# Altium footprint library WR-FPC_0.50mm.PcbLib: 147 footprints (part 6 of 10)
Each footprint in its own frame and in the unit in brackets; x right, y up, seen from the top. Pads: shape width x height; smd on the part's side, far side on the other; paste and mask are expansions set on the pad; w line width, h text height; cw(c..) or ccw(c..) is an arc to the next point about the centre after c.
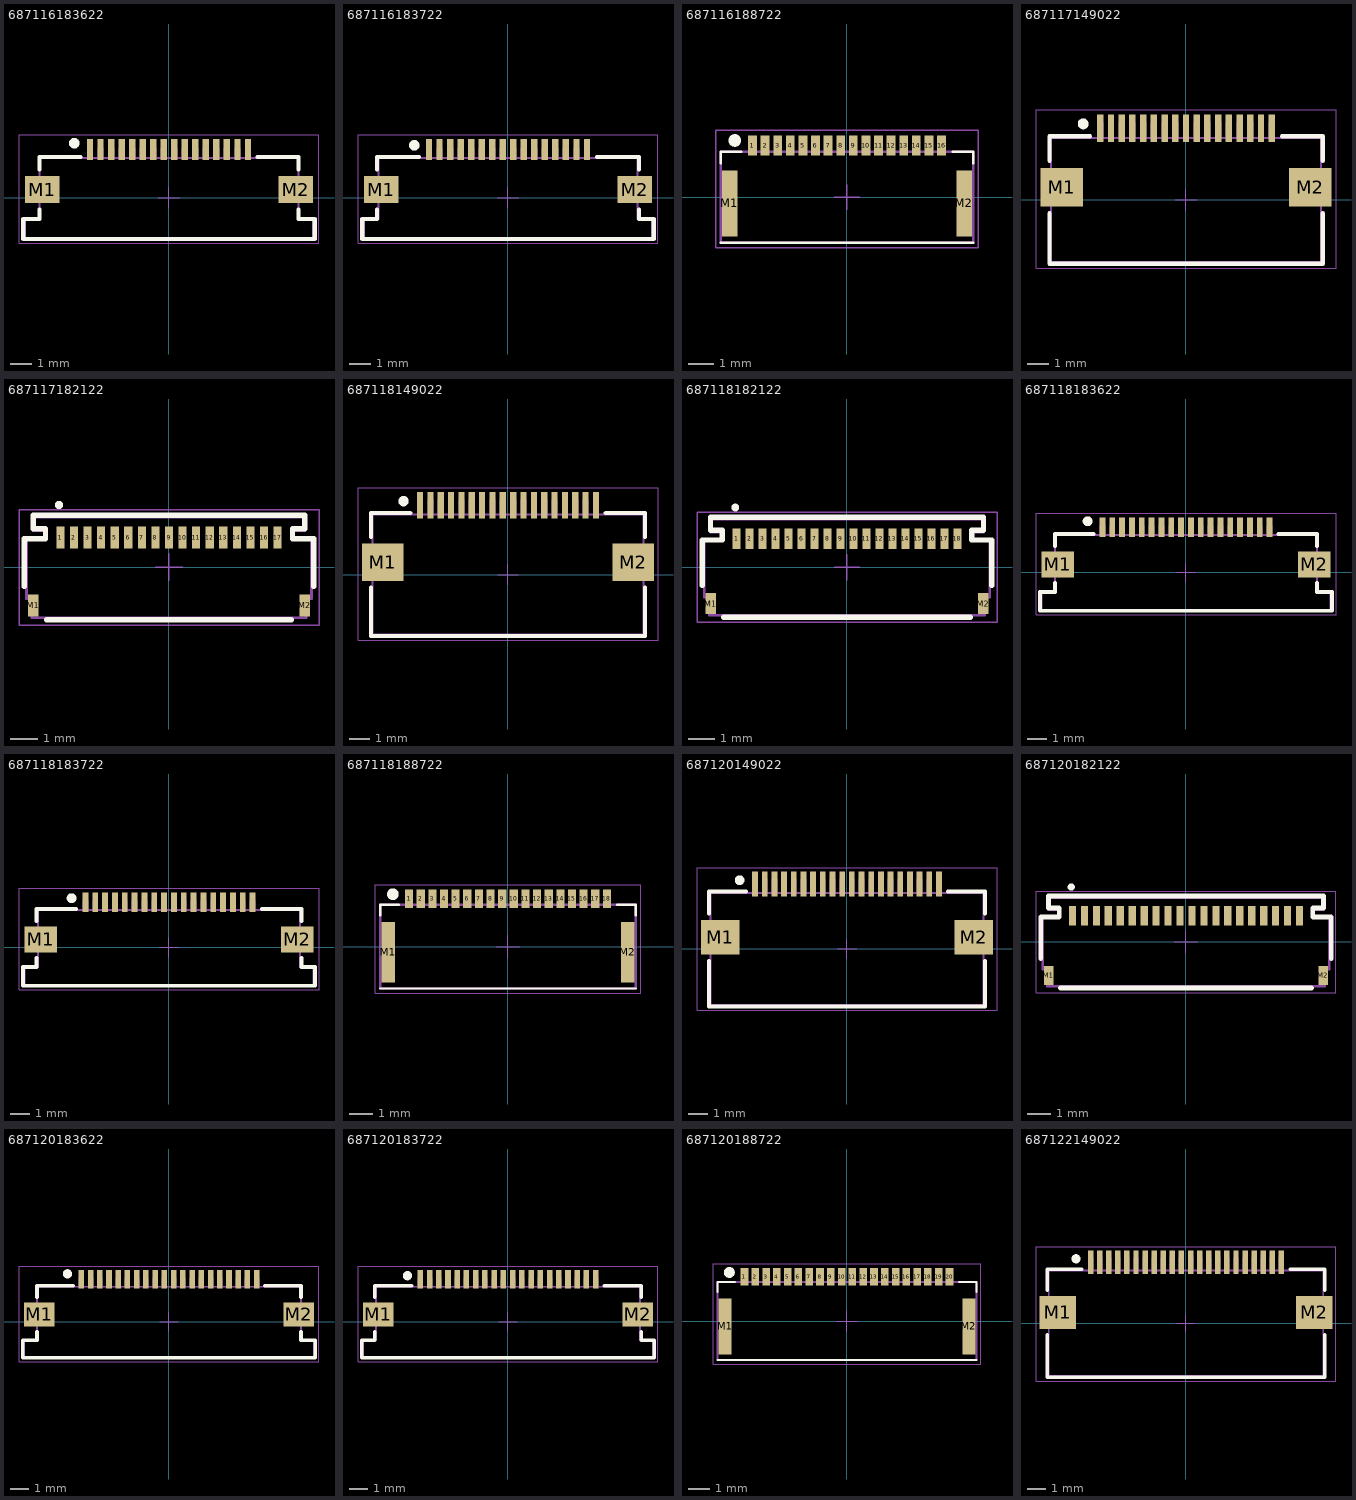
[diagram p5: the footprints below, top view; thin cyan lines are the x and y axes]

## 687116183622 [mm] "ZIF Connectors, Horizontal, Top Contact Low Profile, pitch 0.5mm, 16p"
height 1.3
pads (18):
  rect 0.3x1 smd: 1(-3.75,2.3) 2(-3.25,2.3) 3(-2.75,2.3) 4(-2.25,2.3) 5(-1.75,2.3) 6(-1.25,2.3) 7(-0.75,2.3) 8(-0.25,2.3) 9(0.25,2.3) 10(0.75,2.3) 11(1.25,2.3) 12(1.75,2.3) 13(2.25,2.3) 14(2.75,2.3) 15(3.25,2.3) 16(3.75,2.3)
  rect 1.65x1.3 smd: M1(-6.025,0.4) M2(6.025,0.4)
Top Overlay:
  circle w0.25: c-4.5,2.6 r0.125
  lines w0.2: -6.15,-0.55 -6.15,-1 -6.925,-1 -6.925,-1.95 6.925,-1.95 6.925,-1 6.15,-1 6.15,-0.55 ; -6.15,1.35 -6.15,1.95 -4.2,1.95 ; 4.2,1.95 6.15,1.95 6.15,1.35
Top Designator:
  text ".Designator" at -7.498,-0.5 h1.5
Top Component Outline:
  lines w0.1: -3.85,1.9 -3.85,2.35 -3.65,2.35 -3.65,1.9 ; -3.35,1.9 -3.35,2.35 -3.15,2.35 -3.15,1.9 ; -2.85,1.9 -2.85,2.35 -2.65,2.35 -2.65,1.9 ; -2.35,1.9 -2.35,2.35 -2.15,2.35 -2.15,1.9 ; -1.85,1.9 -1.85,2.35 -1.65,2.35 -1.65,1.9 ; -1.35,1.9 -1.35,2.35 -1.15,2.35 -1.15,1.9 ; -0.85,1.9 -0.85,2.35 -0.65,2.35 -0.65,1.9 ; -0.35,1.9 -0.35,2.35 -0.15,2.35 -0.15,1.9 ; 0.15,1.9 0.15,2.35 0.35,2.35 0.35,1.9 ; 0.65,1.9 0.65,2.35 0.85,2.35 0.85,1.9 ; 1.15,1.9 1.15,2.35 1.35,2.35 1.35,1.9 ; 1.65,1.9 1.65,2.35 1.85,2.35 1.85,1.9 ; 2.15,1.9 2.15,2.35 2.35,2.35 2.35,1.9 ; 2.65,1.9 2.65,2.35 2.85,2.35 2.85,1.9 ; 3.15,1.9 3.15,2.35 3.35,2.35 3.35,1.9 ; 3.65,1.9 3.65,2.35 3.85,2.35 3.85,1.9 ; -6.85,-1.9 -6.85,-1 -6.15,-1 -6.15,1.9 6.15,1.9 6.15,-1 6.85,-1 6.85,-1.9 -6.85,-1.9
Top 3D Body:
  lines w0.1: -3.85,1.9 -3.85,2.35 -3.65,2.35 -3.65,1.9 ; -3.35,1.9 -3.35,2.35 -3.15,2.35 -3.15,1.9 ; -2.85,1.9 -2.85,2.35 -2.65,2.35 -2.65,1.9 ; -2.35,1.9 -2.35,2.35 -2.15,2.35 -2.15,1.9 ; -1.85,1.9 -1.85,2.35 -1.65,2.35 -1.65,1.9 ; -1.35,1.9 -1.35,2.35 -1.15,2.35 -1.15,1.9 ; -0.85,1.9 -0.85,2.35 -0.65,2.35 -0.65,1.9 ; -0.35,1.9 -0.35,2.35 -0.15,2.35 -0.15,1.9 ; 0.15,1.9 0.15,2.35 0.35,2.35 0.35,1.9 ; 0.65,1.9 0.65,2.35 0.85,2.35 0.85,1.9 ; 1.15,1.9 1.15,2.35 1.35,2.35 1.35,1.9 ; 1.65,1.9 1.65,2.35 1.85,2.35 1.85,1.9 ; 2.15,1.9 2.15,2.35 2.35,2.35 2.35,1.9 ; 2.65,1.9 2.65,2.35 2.85,2.35 2.85,1.9 ; 3.15,1.9 3.15,2.35 3.35,2.35 3.35,1.9 ; 3.65,1.9 3.65,2.35 3.85,2.35 3.85,1.9 ; -6.85,-1.9 6.85,-1.9 6.85,-1 6.15,-1 6.15,1.9 -6.15,1.9 -6.15,-1 -6.85,-1 -6.85,-1.9
Top Courtyard:
  lines w0.05: -0.5,0 0.5,0 ; 0,-0.5 0,0.5 ; -7.125,-2.15 -7.125,3 7.125,3 7.125,-2.15 -7.125,-2.15
3D body "687116183622.stp": height 1.28, standoff -0.01, extent -6.85,-1.9 6.85,2.35

## 687116183722 [mm] "ZIF Connectors, Horizontal, Bottom Contact Low Profile, pitch 0.5mm, 16p"
height 1.3
pads (18):
  rect 0.3x1 smd: 1(-3.75,2.3) 2(-3.25,2.3) 3(-2.75,2.3) 4(-2.25,2.3) 5(-1.75,2.3) 6(-1.25,2.3) 7(-0.75,2.3) 8(-0.25,2.3) 9(0.25,2.3) 10(0.75,2.3) 11(1.25,2.3) 12(1.75,2.3) 13(2.25,2.3) 14(2.75,2.3) 15(3.25,2.3) 16(3.75,2.3)
  rect 1.65x1.3 smd: M1(-6.025,0.4) M2(6.025,0.4)
Top Overlay:
  circle w0.25: c-4.45,2.5 r0.125
  lines w0.2: -6.225,-0.55 -6.225,-1 -6.925,-1 -6.925,-1.95 6.925,-1.95 6.925,-1 6.225,-1 6.225,-0.55 ; -6.225,1.35 -6.225,1.95 -4.225,1.95 ; 4.225,1.95 6.225,1.95 6.225,1.35
Top Designator:
  text ".Designator" at -7.498,-0.5 h1.5
Top Component Outline:
  lines w0.1: -3.85,1.9 -3.85,2.35 -3.65,2.35 -3.65,1.9 ; -3.35,1.9 -3.35,2.35 -3.15,2.35 -3.15,1.9 ; -2.85,1.9 -2.85,2.35 -2.65,2.35 -2.65,1.9 ; -2.35,1.9 -2.35,2.35 -2.15,2.35 -2.15,1.9 ; -1.85,1.9 -1.85,2.35 -1.65,2.35 -1.65,1.9 ; -1.35,1.9 -1.35,2.35 -1.15,2.35 -1.15,1.9 ; -0.85,1.9 -0.85,2.35 -0.65,2.35 -0.65,1.9 ; -0.35,1.9 -0.35,2.35 -0.15,2.35 -0.15,1.9 ; 0.15,1.9 0.15,2.35 0.35,2.35 0.35,1.9 ; 0.65,1.9 0.65,2.35 0.85,2.35 0.85,1.9 ; 1.15,1.9 1.15,2.35 1.35,2.35 1.35,1.9 ; 1.65,1.9 1.65,2.35 1.85,2.35 1.85,1.9 ; 2.15,1.9 2.15,2.35 2.35,2.35 2.35,1.9 ; 2.65,1.9 2.65,2.35 2.85,2.35 2.85,1.9 ; 3.15,1.9 3.15,2.35 3.35,2.35 3.35,1.9 ; 3.65,1.9 3.65,2.35 3.85,2.35 3.85,1.9 ; -6.85,-1.9 6.85,-1.9 6.85,-1 6.15,-1 6.15,1.9 -6.15,1.9 -6.15,-1 -6.85,-1 -6.85,-1.9
Top 3D Body:
  lines w0.1: -3.85,1.9 -3.85,2.35 -3.65,2.35 -3.65,1.9 ; -3.35,1.9 -3.35,2.35 -3.15,2.35 -3.15,1.9 ; -2.85,1.9 -2.85,2.35 -2.65,2.35 -2.65,1.9 ; -2.35,1.9 -2.35,2.35 -2.15,2.35 -2.15,1.9 ; -1.85,1.9 -1.85,2.35 -1.65,2.35 -1.65,1.9 ; -1.35,1.9 -1.35,2.35 -1.15,2.35 -1.15,1.9 ; -0.85,1.9 -0.85,2.35 -0.65,2.35 -0.65,1.9 ; -0.35,1.9 -0.35,2.35 -0.15,2.35 -0.15,1.9 ; 0.15,1.9 0.15,2.35 0.35,2.35 0.35,1.9 ; 0.65,1.9 0.65,2.35 0.85,2.35 0.85,1.9 ; 1.15,1.9 1.15,2.35 1.35,2.35 1.35,1.9 ; 1.65,1.9 1.65,2.35 1.85,2.35 1.85,1.9 ; 2.15,1.9 2.15,2.35 2.35,2.35 2.35,1.9 ; 2.65,1.9 2.65,2.35 2.85,2.35 2.85,1.9 ; 3.15,1.9 3.15,2.35 3.35,2.35 3.35,1.9 ; 3.65,1.9 3.65,2.35 3.85,2.35 3.85,1.9 ; -6.85,-1.9 -6.85,-1 -6.15,-1 -6.15,1.9 6.15,1.9 6.15,-1 6.85,-1 6.85,-1.9 -6.85,-1.9
Top Courtyard:
  lines w0.05: -0.5,0 0.5,0 ; 0,-0.5 0,0.5 ; -7.125,-2.15 7.125,-2.15 7.125,3 -7.125,3 -7.125,-2.15
3D body "687116183722.stp": height 1.28, standoff -0.01, extent -6.85,-1.9 6.85,2.35

## 687116188722 [mm] "0.5 mm LIF Horizontal FFC Connector, 16pins"
height 1.2
pads (18):
  rect 0.35x0.8 smd: 1(-3.75,2.05) 2(-3.25,2.05) 3(-2.75,2.05) 4(-2.25,2.05) 5(-1.75,2.05) 6(-1.25,2.05) 7(-0.75,2.05) 8(-0.25,2.05) 9(0.25,2.05) 10(0.75,2.05) 11(1.25,2.05) 12(1.75,2.05) 13(2.25,2.05) 14(2.75,2.05) 15(3.25,2.05) 16(3.75,2.05)
  rect 0.6x2.6 smd: M1(-4.65,-0.25) M2(4.65,-0.25)
Top Overlay:
  circle w0.25: c-4.45,2.25 r0.125
  lines w0.1: -5,-1.8 5,-1.8 ; -5,1.35 -5,1.8 -4.2,1.8 ; 4.2,1.8 5,1.8 5,1.35
Top Designator:
  text ".Designator" at -7.498,-0.5 h1.5
Top Component Outline:
  lines w0.1: -3.85,1.8 -3.85,2.3 -3.65,2.3 -3.65,1.8 ; -3.35,1.8 -3.35,2.3 -3.15,2.3 -3.15,1.8 ; -2.85,1.8 -2.85,2.3 -2.65,2.3 -2.65,1.8 ; -2.35,1.8 -2.35,2.3 -2.15,2.3 -2.15,1.8 ; -1.85,1.8 -1.85,2.3 -1.65,2.3 -1.65,1.8 ; -1.35,1.8 -1.35,2.3 -1.15,2.3 -1.15,1.8 ; -0.85,1.8 -0.85,2.3 -0.65,2.3 -0.65,1.8 ; -0.35,1.8 -0.35,2.3 -0.15,2.3 -0.15,1.8 ; 0.15,1.8 0.15,2.3 0.35,2.3 0.35,1.8 ; 0.65,1.8 0.65,2.3 0.85,2.3 0.85,1.8 ; 1.15,1.8 1.15,2.3 1.35,2.3 1.35,1.8 ; 1.65,1.8 1.65,2.3 1.85,2.3 1.85,1.8 ; 2.15,1.8 2.15,2.3 2.35,2.3 2.35,1.8 ; 2.65,1.8 2.65,2.3 2.85,2.3 2.85,1.8 ; 3.15,1.8 3.15,2.3 3.35,2.3 3.35,1.8 ; 3.65,1.8 3.65,2.3 3.85,2.3 3.85,1.8 ; -5,-1.8 5,-1.8 5,1.8 -5,1.8 -5,-1.8
Top 3D Body:
  lines w0.1: -3.85,1.8 -3.85,2.3 -3.65,2.3 -3.65,1.8 ; -3.35,1.8 -3.35,2.3 -3.15,2.3 -3.15,1.8 ; -2.85,1.8 -2.85,2.3 -2.65,2.3 -2.65,1.8 ; -2.35,1.8 -2.35,2.3 -2.15,2.3 -2.15,1.8 ; -1.85,1.8 -1.85,2.3 -1.65,2.3 -1.65,1.8 ; -1.35,1.8 -1.35,2.3 -1.15,2.3 -1.15,1.8 ; -0.85,1.8 -0.85,2.3 -0.65,2.3 -0.65,1.8 ; -0.35,1.8 -0.35,2.3 -0.15,2.3 -0.15,1.8 ; 0.15,1.8 0.15,2.3 0.35,2.3 0.35,1.8 ; 0.65,1.8 0.65,2.3 0.85,2.3 0.85,1.8 ; 1.15,1.8 1.15,2.3 1.35,2.3 1.35,1.8 ; 1.65,1.8 1.65,2.3 1.85,2.3 1.85,1.8 ; 2.15,1.8 2.15,2.3 2.35,2.3 2.35,1.8 ; 2.65,1.8 2.65,2.3 2.85,2.3 2.85,1.8 ; 3.15,1.8 3.15,2.3 3.35,2.3 3.35,1.8 ; 3.65,1.8 3.65,2.3 3.85,2.3 3.85,1.8 ; -5,-1.8 -5,1.8 5,1.8 5,-1.8 -5,-1.8
Top Courtyard:
  lines w0.05: -0.5,0 0.5,0 ; 0,-0.5 0,0.5 ; -5.2,-2 5.2,-2 5.2,2.65 -5.2,2.65 -5.2,-2
3D body "687116188722.stp": height 1.2, standoff 0, extent -5,-1.8 5,2.3

## 687117149022 [mm] "0.50mm SMT ZIF Horizontal Hinge Type Bottom Contact, 17p"
height 2.3
pads (19):
  rect 0.3x1.3 smd: 1(-4,3.35) 2(-3.5,3.35) 3(-3,3.35) 4(-2.5,3.35) 5(-2,3.35) 6(-1.5,3.35) 7(-1,3.35) 8(-0.5,3.35) 9(0,3.35) 10(0.5,3.35) 11(1,3.35) 12(1.5,3.35) 13(2,3.35) 14(2.5,3.35) 15(3,3.35) 16(3.5,3.35) 17(4,3.35)
  rect 2x1.8 smd: M1(-5.8,0.6) M2(5.8,0.6)
Top Overlay:
  circle w0.25: c-4.8,3.55 r0.125
  lines w0.2: -6.375,-0.625 -6.375,-2.975 6.375,-2.975 6.375,-0.625 ; -6.375,1.825 -6.375,2.975 -4.475,2.975 ; 4.475,2.975 6.375,2.975 6.375,1.825
Top Designator:
  text ".Designator" at -7.498,-0.5 h1.5
Top Component Outline:
  lines w0.1: -4.1,2.9 -4.1,3.6 -3.9,3.6 -3.9,2.9 ; -3.6,2.9 -3.6,3.6 -3.4,3.6 -3.4,2.9 ; -3.1,2.9 -3.1,3.6 -2.9,3.6 -2.9,2.9 ; -2.6,2.9 -2.6,3.6 -2.4,3.6 -2.4,2.9 ; -2.1,2.9 -2.1,3.6 -1.9,3.6 -1.9,2.9 ; -1.6,2.9 -1.6,3.6 -1.4,3.6 -1.4,2.9 ; -1.1,2.9 -1.1,3.6 -0.9,3.6 -0.9,2.9 ; -0.6,2.9 -0.6,3.6 -0.4,3.6 -0.4,2.9 ; -0.1,2.9 -0.1,3.6 0.1,3.6 0.1,2.9 ; 0.4,2.9 0.4,3.6 0.6,3.6 0.6,2.9 ; 0.9,2.9 0.9,3.6 1.1,3.6 1.1,2.9 ; 1.4,2.9 1.4,3.6 1.6,3.6 1.6,2.9 ; 1.9,2.9 1.9,3.6 2.1,3.6 2.1,2.9 ; 2.4,2.9 2.4,3.6 2.6,3.6 2.6,2.9 ; 2.9,2.9 2.9,3.6 3.1,3.6 3.1,2.9 ; 3.4,2.9 3.4,3.6 3.6,3.6 3.6,2.9 ; 3.9,2.9 3.9,3.6 4.1,3.6 4.1,2.9 ; -6.3,-2.9 6.3,-2.9 6.3,2.9 -6.3,2.9 -6.3,-2.9
Top 3D Body:
  lines w0.1: -4.1,2.9 -4.1,3.6 -3.9,3.6 -3.9,2.9 ; -3.6,2.9 -3.6,3.6 -3.4,3.6 -3.4,2.9 ; -3.1,2.9 -3.1,3.6 -2.9,3.6 -2.9,2.9 ; -2.6,2.9 -2.6,3.6 -2.4,3.6 -2.4,2.9 ; -2.1,2.9 -2.1,3.6 -1.9,3.6 -1.9,2.9 ; -1.6,2.9 -1.6,3.6 -1.4,3.6 -1.4,2.9 ; -1.1,2.9 -1.1,3.6 -0.9,3.6 -0.9,2.9 ; -0.6,2.9 -0.6,3.6 -0.4,3.6 -0.4,2.9 ; -0.1,2.9 -0.1,3.6 0.1,3.6 0.1,2.9 ; 0.4,2.9 0.4,3.6 0.6,3.6 0.6,2.9 ; 0.9,2.9 0.9,3.6 1.1,3.6 1.1,2.9 ; 1.4,2.9 1.4,3.6 1.6,3.6 1.6,2.9 ; 1.9,2.9 1.9,3.6 2.1,3.6 2.1,2.9 ; 2.4,2.9 2.4,3.6 2.6,3.6 2.6,2.9 ; 2.9,2.9 2.9,3.6 3.1,3.6 3.1,2.9 ; 3.4,2.9 3.4,3.6 3.6,3.6 3.6,2.9 ; 3.9,2.9 3.9,3.6 4.1,3.6 4.1,2.9 ; -6.3,-2.9 -6.3,2.9 6.3,2.9 6.3,-2.9 -6.3,-2.9
Top Courtyard:
  lines w0.05: -0.5,0 0.5,0 ; 0,-0.5 0,0.5 ; -7,-3.175 7,-3.175 7,4.2 -7,4.2 -7,-3.175
3D body "687117149022.stp": height 2.25, standoff 0, extent -6.3,-2.9 6.3,3.6

## 687117182122 [mm] "ZIF Connectors, Horizontal, Dual Contact Back Locking, pitch 0.5mm, 17p"
height 1.06
pads (19):
  rect 0.3x0.8 smd: 1(-4,1.1) 2(-3.5,1.1) 3(-3,1.1) 4(-2.5,1.1) 5(-2,1.1) 6(-1.5,1.1) 7(-1,1.1) 8(-0.5,1.1) 9(0,1.1) 10(0.5,1.1) 11(1,1.1) 12(1.5,1.1) 13(2,1.1) 14(2.5,1.1) 15(3,1.1) 16(3.5,1.1) 17(4,1.1)
  rect 0.4x0.8 smd: M1(-5,-1.4) M2(5,-1.4)
Top Overlay:
  circle w0.15: c-4.05,2.3 r0.075
  lines w0.2: -5.325,-0.7 -5.325,1.05 -4.55,1.05 -4.55,1.425 -5,1.425 -5,1.925 5,1.925 5,1.425 4.55,1.425 4.55,1.05 5.325,1.05 5.325,-0.7 ; -4.5,-1.925 4.5,-1.925
Top Designator:
  text ".Designator" at -7.498,-0.5 h1.5
Top Component Outline:
  lines w0.1: -5.25,-1.15 -5.05,-1.15 -5.05,-1.85 5.05,-1.85 5.05,-1.15 5.25,-1.15 5.25,1.05 4.55,1.05 4.55,1.35 5,1.35 5,1.85 -5,1.85 -5,1.35 -4.55,1.35 -4.55,1.05 -5.25,1.05 -5.25,-1.15
Top 3D Body:
  lines w0.1: -5.25,-1.15 -5.25,1.05 -4.55,1.05 -4.55,1.35 -5,1.35 -5,1.85 5,1.85 5,1.35 4.55,1.35 4.55,1.05 5.25,1.05 5.25,-1.15 5.05,-1.15 5.05,-1.85 -5.05,-1.85 -5.05,-1.15 -5.25,-1.15
Top Courtyard:
  lines w0.05: -0.5,0 0.5,0 ; 0,-0.5 0,0.5 ; -5.525,-2.125 5.525,-2.125 5.525,2.125 -5.525,2.125 -5.525,-2.125
3D body "687117182122.stp": height 0.98, standoff -0.01, extent -5.25,-1.85 5.25,1.85

## 687118149022 [mm] "0.50mm SMT ZIF Horizontal Hinge Type Bottom Contact, 18p"
height 2.3
pads (20):
  rect 0.3x1.3 smd: 1(-4.25,3.35) 2(-3.75,3.35) 3(-3.25,3.35) 4(-2.75,3.35) 5(-2.25,3.35) 6(-1.75,3.35) 7(-1.25,3.35) 8(-0.75,3.35) 9(-0.25,3.35) 10(0.25,3.35) 11(0.75,3.35) 12(1.25,3.35) 13(1.75,3.35) 14(2.25,3.35) 15(2.75,3.35) 16(3.25,3.35) 17(3.75,3.35) 18(4.25,3.35)
  rect 2x1.8 smd: M1(-6.05,0.6) M2(6.05,0.6)
Top Overlay:
  circle w0.25: c-5.05,3.55 r0.125
  lines w0.2: -6.625,-0.625 -6.625,-2.975 6.625,-2.975 6.625,-0.625 ; -6.625,1.825 -6.625,2.975 -4.725,2.975 ; 4.725,2.975 6.625,2.975 6.625,1.825
Top Designator:
  text ".Designator" at -7.498,-0.5 h1.5
Top Component Outline:
  lines w0.1: -4.35,2.9 -4.35,3.6 -4.15,3.6 -4.15,2.9 ; -3.85,2.9 -3.85,3.6 -3.65,3.6 -3.65,2.9 ; -3.35,2.9 -3.35,3.6 -3.15,3.6 -3.15,2.9 ; -2.85,2.9 -2.85,3.6 -2.65,3.6 -2.65,2.9 ; -2.35,2.9 -2.35,3.6 -2.15,3.6 -2.15,2.9 ; -1.85,2.9 -1.85,3.6 -1.65,3.6 -1.65,2.9 ; -1.35,2.9 -1.35,3.6 -1.15,3.6 -1.15,2.9 ; -0.85,2.9 -0.85,3.6 -0.65,3.6 -0.65,2.9 ; -0.35,2.9 -0.35,3.6 -0.15,3.6 -0.15,2.9 ; 0.15,2.9 0.15,3.6 0.35,3.6 0.35,2.9 ; 0.65,2.9 0.65,3.6 0.85,3.6 0.85,2.9 ; 1.15,2.9 1.15,3.6 1.35,3.6 1.35,2.9 ; 1.65,2.9 1.65,3.6 1.85,3.6 1.85,2.9 ; 2.15,2.9 2.15,3.6 2.35,3.6 2.35,2.9 ; 2.65,2.9 2.65,3.6 2.85,3.6 2.85,2.9 ; 3.15,2.9 3.15,3.6 3.35,3.6 3.35,2.9 ; 3.65,2.9 3.65,3.6 3.85,3.6 3.85,2.9 ; 4.15,2.9 4.15,3.6 4.35,3.6 4.35,2.9 ; -6.55,-2.9 6.55,-2.9 6.55,2.9 -6.55,2.9 -6.55,-2.9
Top 3D Body:
  lines w0.1: -4.35,2.9 -4.35,3.6 -4.15,3.6 -4.15,2.9 ; -3.85,2.9 -3.85,3.6 -3.65,3.6 -3.65,2.9 ; -3.35,2.9 -3.35,3.6 -3.15,3.6 -3.15,2.9 ; -2.85,2.9 -2.85,3.6 -2.65,3.6 -2.65,2.9 ; -2.35,2.9 -2.35,3.6 -2.15,3.6 -2.15,2.9 ; -1.85,2.9 -1.85,3.6 -1.65,3.6 -1.65,2.9 ; -1.35,2.9 -1.35,3.6 -1.15,3.6 -1.15,2.9 ; -0.85,2.9 -0.85,3.6 -0.65,3.6 -0.65,2.9 ; -0.35,2.9 -0.35,3.6 -0.15,3.6 -0.15,2.9 ; 0.15,2.9 0.15,3.6 0.35,3.6 0.35,2.9 ; 0.65,2.9 0.65,3.6 0.85,3.6 0.85,2.9 ; 1.15,2.9 1.15,3.6 1.35,3.6 1.35,2.9 ; 1.65,2.9 1.65,3.6 1.85,3.6 1.85,2.9 ; 2.15,2.9 2.15,3.6 2.35,3.6 2.35,2.9 ; 2.65,2.9 2.65,3.6 2.85,3.6 2.85,2.9 ; 3.15,2.9 3.15,3.6 3.35,3.6 3.35,2.9 ; 3.65,2.9 3.65,3.6 3.85,3.6 3.85,2.9 ; 4.15,2.9 4.15,3.6 4.35,3.6 4.35,2.9 ; -6.55,-2.9 -6.55,2.9 6.55,2.9 6.55,-2.9 -6.55,-2.9
Top Courtyard:
  lines w0.05: -0.5,0 0.5,0 ; 0,-0.5 0,0.5 ; -7.25,-3.175 7.25,-3.175 7.25,4.2 -7.25,4.2 -7.25,-3.175
3D body "687118149022.stp": height 2.25, standoff 0, extent -6.55,-2.9 6.55,3.6

## 687118182122 [mm] "ZIF Connectors, Horizontal, Dual Contact Back Locking, pitch 0.5mm, 18p"
height 1.06
pads (20):
  rect 0.3x0.8 smd: 1(-4.25,1.1) 2(-3.75,1.1) 3(-3.25,1.1) 4(-2.75,1.1) 5(-2.25,1.1) 6(-1.75,1.1) 7(-1.25,1.1) 8(-0.75,1.1) 9(-0.25,1.1) 10(0.25,1.1) 11(0.75,1.1) 12(1.25,1.1) 13(1.75,1.1) 14(2.25,1.1) 15(2.75,1.1) 16(3.25,1.1) 17(3.75,1.1) 18(4.25,1.1)
  rect 0.4x0.8 smd: M1(-5.25,-1.4) M2(5.25,-1.4)
Top Overlay:
  circle w0.15: c-4.3,2.3 r0.075
  lines w0.2: -5.575,-0.7 -5.575,1.05 -4.8,1.05 -4.8,1.425 -5.25,1.425 -5.25,1.925 5.25,1.925 5.25,1.425 4.8,1.425 4.8,1.05 5.575,1.05 5.575,-0.7 ; -4.75,-1.925 4.75,-1.925
Top Designator:
  text ".Designator" at -7.498,-0.5 h1.5
Top Component Outline:
  lines w0.1: -5.5,-1.15 -5.5,1.05 -4.8,1.05 -4.8,1.35 -5.25,1.35 -5.25,1.85 5.25,1.85 5.25,1.35 4.8,1.35 4.8,1.05 5.5,1.05 5.5,-1.15 5.3,-1.15 5.3,-1.85 -5.3,-1.85 -5.3,-1.15 -5.5,-1.15
Top 3D Body:
  lines w0.1: -5.5,-1.15 -5.3,-1.15 -5.3,-1.85 5.3,-1.85 5.3,-1.15 5.5,-1.15 5.5,1.05 4.8,1.05 4.8,1.35 5.25,1.35 5.25,1.85 -5.25,1.85 -5.25,1.35 -4.8,1.35 -4.8,1.05 -5.5,1.05 -5.5,-1.15
Top Courtyard:
  lines w0.05: -0.5,0 0.5,0 ; 0,-0.5 0,0.5 ; -5.775,-2.125 -5.775,2.125 5.775,2.125 5.775,-2.125 -5.775,-2.125
3D body "687118182122.stp": height 0.98, standoff -0.01, extent -5.5,-1.85 5.5,1.85

## 687118183622 [mm] "ZIF Connectors, Horizontal, Top Contact Low Profile, pitch 0.5mm, 18p"
height 1.3
pads (20):
  rect 0.3x1 smd: 1(-4.25,2.3) 2(-3.75,2.3) 3(-3.25,2.3) 4(-2.75,2.3) 5(-2.25,2.3) 6(-1.75,2.3) 7(-1.25,2.3) 8(-0.75,2.3) 9(-0.25,2.3) 10(0.25,2.3) 11(0.75,2.3) 12(1.25,2.3) 13(1.75,2.3) 14(2.25,2.3) 15(2.75,2.3) 16(3.25,2.3) 17(3.75,2.3) 18(4.25,2.3)
  rect 1.65x1.3 smd: M1(-6.525,0.4) M2(6.525,0.4)
Top Overlay:
  circle w0.25: c-5,2.6 r0.125
  lines w0.2: -6.65,-0.55 -6.65,-1 -7.425,-1 -7.425,-1.95 7.425,-1.95 7.425,-1 6.65,-1 6.65,-0.55 ; -6.65,1.35 -6.65,1.95 -4.7,1.95 ; 4.7,1.95 6.65,1.95 6.65,1.35
Top Designator:
  text ".Designator" at -7.498,-0.5 h1.5
Top Component Outline:
  lines w0.1: -4.35,1.9 -4.35,2.35 -4.15,2.35 -4.15,1.9 ; -3.85,1.9 -3.85,2.35 -3.65,2.35 -3.65,1.9 ; -3.35,1.9 -3.35,2.35 -3.15,2.35 -3.15,1.9 ; -2.85,1.9 -2.85,2.35 -2.65,2.35 -2.65,1.9 ; -2.35,1.9 -2.35,2.35 -2.15,2.35 -2.15,1.9 ; -1.85,1.9 -1.85,2.35 -1.65,2.35 -1.65,1.9 ; -1.35,1.9 -1.35,2.35 -1.15,2.35 -1.15,1.9 ; -0.85,1.9 -0.85,2.35 -0.65,2.35 -0.65,1.9 ; -0.35,1.9 -0.35,2.35 -0.15,2.35 -0.15,1.9 ; 0.15,1.9 0.15,2.35 0.35,2.35 0.35,1.9 ; 0.65,1.9 0.65,2.35 0.85,2.35 0.85,1.9 ; 1.15,1.9 1.15,2.35 1.35,2.35 1.35,1.9 ; 1.65,1.9 1.65,2.35 1.85,2.35 1.85,1.9 ; 2.15,1.9 2.15,2.35 2.35,2.35 2.35,1.9 ; 2.65,1.9 2.65,2.35 2.85,2.35 2.85,1.9 ; 3.15,1.9 3.15,2.35 3.35,2.35 3.35,1.9 ; 3.65,1.9 3.65,2.35 3.85,2.35 3.85,1.9 ; 4.15,1.9 4.15,2.35 4.35,2.35 4.35,1.9 ; -7.35,-1.9 -7.35,-1 -6.65,-1 -6.65,1.9 6.65,1.9 6.65,-1 7.35,-1 7.35,-1.9 -7.35,-1.9
Top 3D Body:
  lines w0.1: -4.35,1.9 -4.35,2.35 -4.15,2.35 -4.15,1.9 ; -3.85,1.9 -3.85,2.35 -3.65,2.35 -3.65,1.9 ; -3.35,1.9 -3.35,2.35 -3.15,2.35 -3.15,1.9 ; -2.85,1.9 -2.85,2.35 -2.65,2.35 -2.65,1.9 ; -2.35,1.9 -2.35,2.35 -2.15,2.35 -2.15,1.9 ; -1.85,1.9 -1.85,2.35 -1.65,2.35 -1.65,1.9 ; -1.35,1.9 -1.35,2.35 -1.15,2.35 -1.15,1.9 ; -0.85,1.9 -0.85,2.35 -0.65,2.35 -0.65,1.9 ; -0.35,1.9 -0.35,2.35 -0.15,2.35 -0.15,1.9 ; 0.15,1.9 0.15,2.35 0.35,2.35 0.35,1.9 ; 0.65,1.9 0.65,2.35 0.85,2.35 0.85,1.9 ; 1.15,1.9 1.15,2.35 1.35,2.35 1.35,1.9 ; 1.65,1.9 1.65,2.35 1.85,2.35 1.85,1.9 ; 2.15,1.9 2.15,2.35 2.35,2.35 2.35,1.9 ; 2.65,1.9 2.65,2.35 2.85,2.35 2.85,1.9 ; 3.15,1.9 3.15,2.35 3.35,2.35 3.35,1.9 ; 3.65,1.9 3.65,2.35 3.85,2.35 3.85,1.9 ; 4.15,1.9 4.15,2.35 4.35,2.35 4.35,1.9 ; -7.35,-1.9 7.35,-1.9 7.35,-1 6.65,-1 6.65,1.9 -6.65,1.9 -6.65,-1 -7.35,-1 -7.35,-1.9
Top Courtyard:
  lines w0.05: -0.5,0 0.5,0 ; 0,-0.5 0,0.5 ; -7.625,-2.15 -7.625,3 7.625,3 7.625,-2.15 -7.625,-2.15
3D body "687118183622.stp": height 1.28, standoff -0.01, extent -7.35,-1.9 7.35,2.35

## 687118183722 [mm] "ZIF Connectors, Horizontal, Bottom Contact Low Profile, pitch 0.5mm, 18p"
height 1.3
pads (20):
  rect 0.3x1 smd: 1(-4.25,2.3) 2(-3.75,2.3) 3(-3.25,2.3) 4(-2.75,2.3) 5(-2.25,2.3) 6(-1.75,2.3) 7(-1.25,2.3) 8(-0.75,2.3) 9(-0.25,2.3) 10(0.25,2.3) 11(0.75,2.3) 12(1.25,2.3) 13(1.75,2.3) 14(2.25,2.3) 15(2.75,2.3) 16(3.25,2.3) 17(3.75,2.3) 18(4.25,2.3)
  rect 1.65x1.3 smd: M1(-6.525,0.4) M2(6.525,0.4)
Top Overlay:
  circle w0.25: c-4.95,2.5 r0.125
  lines w0.2: -6.725,-0.55 -6.725,-1 -7.425,-1 -7.425,-1.95 7.425,-1.95 7.425,-1 6.725,-1 6.725,-0.55 ; -6.725,1.35 -6.725,1.95 -4.725,1.95 ; 4.725,1.95 6.725,1.95 6.725,1.35
Top Designator:
  text ".Designator" at -7.498,-0.5 h1.5
Top Component Outline:
  lines w0.1: -4.35,1.9 -4.35,2.35 -4.15,2.35 -4.15,1.9 ; -3.85,1.9 -3.85,2.35 -3.65,2.35 -3.65,1.9 ; -3.35,1.9 -3.35,2.35 -3.15,2.35 -3.15,1.9 ; -2.85,1.9 -2.85,2.35 -2.65,2.35 -2.65,1.9 ; -2.35,1.9 -2.35,2.35 -2.15,2.35 -2.15,1.9 ; -1.85,1.9 -1.85,2.35 -1.65,2.35 -1.65,1.9 ; -1.35,1.9 -1.35,2.35 -1.15,2.35 -1.15,1.9 ; -0.85,1.9 -0.85,2.35 -0.65,2.35 -0.65,1.9 ; -0.35,1.9 -0.35,2.35 -0.15,2.35 -0.15,1.9 ; 0.15,1.9 0.15,2.35 0.35,2.35 0.35,1.9 ; 0.65,1.9 0.65,2.35 0.85,2.35 0.85,1.9 ; 1.15,1.9 1.15,2.35 1.35,2.35 1.35,1.9 ; 1.65,1.9 1.65,2.35 1.85,2.35 1.85,1.9 ; 2.15,1.9 2.15,2.35 2.35,2.35 2.35,1.9 ; 2.65,1.9 2.65,2.35 2.85,2.35 2.85,1.9 ; 3.15,1.9 3.15,2.35 3.35,2.35 3.35,1.9 ; 3.65,1.9 3.65,2.35 3.85,2.35 3.85,1.9 ; 4.15,1.9 4.15,2.35 4.35,2.35 4.35,1.9 ; -7.35,-1.9 -7.35,-1 -6.65,-1 -6.65,1.9 6.65,1.9 6.65,-1 7.35,-1 7.35,-1.9 -7.35,-1.9
Top 3D Body:
  lines w0.1: -4.35,1.9 -4.35,2.35 -4.15,2.35 -4.15,1.9 ; -3.85,1.9 -3.85,2.35 -3.65,2.35 -3.65,1.9 ; -3.35,1.9 -3.35,2.35 -3.15,2.35 -3.15,1.9 ; -2.85,1.9 -2.85,2.35 -2.65,2.35 -2.65,1.9 ; -2.35,1.9 -2.35,2.35 -2.15,2.35 -2.15,1.9 ; -1.85,1.9 -1.85,2.35 -1.65,2.35 -1.65,1.9 ; -1.35,1.9 -1.35,2.35 -1.15,2.35 -1.15,1.9 ; -0.85,1.9 -0.85,2.35 -0.65,2.35 -0.65,1.9 ; -0.35,1.9 -0.35,2.35 -0.15,2.35 -0.15,1.9 ; 0.15,1.9 0.15,2.35 0.35,2.35 0.35,1.9 ; 0.65,1.9 0.65,2.35 0.85,2.35 0.85,1.9 ; 1.15,1.9 1.15,2.35 1.35,2.35 1.35,1.9 ; 1.65,1.9 1.65,2.35 1.85,2.35 1.85,1.9 ; 2.15,1.9 2.15,2.35 2.35,2.35 2.35,1.9 ; 2.65,1.9 2.65,2.35 2.85,2.35 2.85,1.9 ; 3.15,1.9 3.15,2.35 3.35,2.35 3.35,1.9 ; 3.65,1.9 3.65,2.35 3.85,2.35 3.85,1.9 ; 4.15,1.9 4.15,2.35 4.35,2.35 4.35,1.9 ; -7.35,-1.9 7.35,-1.9 7.35,-1 6.65,-1 6.65,1.9 -6.65,1.9 -6.65,-1 -7.35,-1 -7.35,-1.9
Top Courtyard:
  lines w0.05: -0.5,0 0.5,0 ; 0,-0.5 0,0.5 ; -7.625,-2.15 -7.625,3 7.625,3 7.625,-2.15 -7.625,-2.15
3D body "687118183722.stp": height 1.28, standoff -0.01, extent -7.35,-1.9 7.35,2.35

## 687118188722 [mm] "0.5 mm LIF Horizontal FFC Connector, 18pins"
height 1.2
pads (20):
  rect 0.35x0.8 smd: 1(-4.25,2.05) 2(-3.75,2.05) 3(-3.25,2.05) 4(-2.75,2.05) 5(-2.25,2.05) 6(-1.75,2.05) 7(-1.25,2.05) 8(-0.75,2.05) 9(-0.25,2.05) 10(0.25,2.05) 11(0.75,2.05) 12(1.25,2.05) 13(1.75,2.05) 14(2.25,2.05) 15(2.75,2.05) 16(3.25,2.05) 17(3.75,2.05) 18(4.25,2.05)
  rect 0.6x2.6 smd: M1(-5.15,-0.25) M2(5.15,-0.25)
Top Overlay:
  circle w0.25: c-4.95,2.25 r0.125
  lines w0.1: -5.5,-1.8 5.5,-1.8 ; -5.5,1.35 -5.5,1.8 -4.7,1.8 ; 4.7,1.8 5.5,1.8 5.5,1.35
Top Designator:
  text ".Designator" at -7.498,-0.5 h1.5
Top Component Outline:
  lines w0.1: -4.35,1.8 -4.35,2.3 -4.15,2.3 -4.15,1.8 ; -3.85,1.8 -3.85,2.3 -3.65,2.3 -3.65,1.8 ; -3.35,1.8 -3.35,2.3 -3.15,2.3 -3.15,1.8 ; -2.85,1.8 -2.85,2.3 -2.65,2.3 -2.65,1.8 ; -2.35,1.8 -2.35,2.3 -2.15,2.3 -2.15,1.8 ; -1.85,1.8 -1.85,2.3 -1.65,2.3 -1.65,1.8 ; -1.35,1.8 -1.35,2.3 -1.15,2.3 -1.15,1.8 ; -0.85,1.8 -0.85,2.3 -0.65,2.3 -0.65,1.8 ; -0.35,1.8 -0.35,2.3 -0.15,2.3 -0.15,1.8 ; 0.15,1.8 0.15,2.3 0.35,2.3 0.35,1.8 ; 0.65,1.8 0.65,2.3 0.85,2.3 0.85,1.8 ; 1.15,1.8 1.15,2.3 1.35,2.3 1.35,1.8 ; 1.65,1.8 1.65,2.3 1.85,2.3 1.85,1.8 ; 2.15,1.8 2.15,2.3 2.35,2.3 2.35,1.8 ; 2.65,1.8 2.65,2.3 2.85,2.3 2.85,1.8 ; 3.15,1.8 3.15,2.3 3.35,2.3 3.35,1.8 ; 3.65,1.8 3.65,2.3 3.85,2.3 3.85,1.8 ; 4.15,1.8 4.15,2.3 4.35,2.3 4.35,1.8 ; -5.5,-1.8 5.5,-1.8 5.5,1.8 -5.5,1.8 -5.5,-1.8
Top 3D Body:
  lines w0.1: -4.35,1.8 -4.35,2.3 -4.15,2.3 -4.15,1.8 ; -3.85,1.8 -3.85,2.3 -3.65,2.3 -3.65,1.8 ; -3.35,1.8 -3.35,2.3 -3.15,2.3 -3.15,1.8 ; -2.85,1.8 -2.85,2.3 -2.65,2.3 -2.65,1.8 ; -2.35,1.8 -2.35,2.3 -2.15,2.3 -2.15,1.8 ; -1.85,1.8 -1.85,2.3 -1.65,2.3 -1.65,1.8 ; -1.35,1.8 -1.35,2.3 -1.15,2.3 -1.15,1.8 ; -0.85,1.8 -0.85,2.3 -0.65,2.3 -0.65,1.8 ; -0.35,1.8 -0.35,2.3 -0.15,2.3 -0.15,1.8 ; 0.15,1.8 0.15,2.3 0.35,2.3 0.35,1.8 ; 0.65,1.8 0.65,2.3 0.85,2.3 0.85,1.8 ; 1.15,1.8 1.15,2.3 1.35,2.3 1.35,1.8 ; 1.65,1.8 1.65,2.3 1.85,2.3 1.85,1.8 ; 2.15,1.8 2.15,2.3 2.35,2.3 2.35,1.8 ; 2.65,1.8 2.65,2.3 2.85,2.3 2.85,1.8 ; 3.15,1.8 3.15,2.3 3.35,2.3 3.35,1.8 ; 3.65,1.8 3.65,2.3 3.85,2.3 3.85,1.8 ; 4.15,1.8 4.15,2.3 4.35,2.3 4.35,1.8 ; -5.5,-1.8 -5.5,1.8 5.5,1.8 5.5,-1.8 -5.5,-1.8
Top Courtyard:
  lines w0.05: -0.5,0 0.5,0 ; 0,-0.5 0,0.5 ; -5.7,-2 5.7,-2 5.7,2.65 -5.7,2.65 -5.7,-2
3D body "687118188722.stp": height 1.2, standoff 0, extent -5.5,-1.8 5.5,2.3

## 687120149022 [mm] "0.50mm SMT ZIF Horizontal Hinge Type Bottom Contact, 20p"
height 2.3
pads (22):
  rect 0.3x1.3 smd: 1(-4.75,3.35) 2(-4.25,3.35) 3(-3.75,3.35) 4(-3.25,3.35) 5(-2.75,3.35) 6(-2.25,3.35) 7(-1.75,3.35) 8(-1.25,3.35) 9(-0.75,3.35) 10(-0.25,3.35) 11(0.25,3.35) 12(0.75,3.35) 13(1.25,3.35) 14(1.75,3.35) 15(2.25,3.35) 16(2.75,3.35) 17(3.25,3.35) 18(3.75,3.35) 19(4.25,3.35) 20(4.75,3.35)
  rect 2x1.8 smd: M1(-6.55,0.6) M2(6.55,0.6)
Top Overlay:
  circle w0.25: c-5.55,3.55 r0.125
  lines w0.2: -7.125,-0.625 -7.125,-2.975 7.125,-2.975 7.125,-0.625 ; -7.125,1.825 -7.125,2.975 -5.225,2.975 ; 5.225,2.975 7.125,2.975 7.125,1.825
Top Designator:
  text ".Designator" at -7.498,-0.5 h1.5
Top Component Outline:
  lines w0.1: -4.85,2.9 -4.85,3.6 -4.65,3.6 -4.65,2.9 ; -4.35,2.9 -4.35,3.6 -4.15,3.6 -4.15,2.9 ; -3.85,2.9 -3.85,3.6 -3.65,3.6 -3.65,2.9 ; -3.35,2.9 -3.35,3.6 -3.15,3.6 -3.15,2.9 ; -2.85,2.9 -2.85,3.6 -2.65,3.6 -2.65,2.9 ; -2.35,2.9 -2.35,3.6 -2.15,3.6 -2.15,2.9 ; -1.85,2.9 -1.85,3.6 -1.65,3.6 -1.65,2.9 ; -1.35,2.9 -1.35,3.6 -1.15,3.6 -1.15,2.9 ; -0.85,2.9 -0.85,3.6 -0.65,3.6 -0.65,2.9 ; -0.35,2.9 -0.35,3.6 -0.15,3.6 -0.15,2.9 ; 0.15,2.9 0.15,3.6 0.35,3.6 0.35,2.9 ; 0.65,2.9 0.65,3.6 0.85,3.6 0.85,2.9 ; 1.15,2.9 1.15,3.6 1.35,3.6 1.35,2.9 ; 1.65,2.9 1.65,3.6 1.85,3.6 1.85,2.9 ; 2.15,2.9 2.15,3.6 2.35,3.6 2.35,2.9 ; 2.65,2.9 2.65,3.6 2.85,3.6 2.85,2.9 ; 3.15,2.9 3.15,3.6 3.35,3.6 3.35,2.9 ; 3.65,2.9 3.65,3.6 3.85,3.6 3.85,2.9 ; 4.15,2.9 4.15,3.6 4.35,3.6 4.35,2.9 ; 4.65,2.9 4.65,3.6 4.85,3.6 4.85,2.9 ; -7.05,-2.9 7.05,-2.9 7.05,2.9 -7.05,2.9 -7.05,-2.9
Top 3D Body:
  lines w0.1: -4.85,2.9 -4.85,3.6 -4.65,3.6 -4.65,2.9 ; -4.35,2.9 -4.35,3.6 -4.15,3.6 -4.15,2.9 ; -3.85,2.9 -3.85,3.6 -3.65,3.6 -3.65,2.9 ; -3.35,2.9 -3.35,3.6 -3.15,3.6 -3.15,2.9 ; -2.85,2.9 -2.85,3.6 -2.65,3.6 -2.65,2.9 ; -2.35,2.9 -2.35,3.6 -2.15,3.6 -2.15,2.9 ; -1.85,2.9 -1.85,3.6 -1.65,3.6 -1.65,2.9 ; -1.35,2.9 -1.35,3.6 -1.15,3.6 -1.15,2.9 ; -0.85,2.9 -0.85,3.6 -0.65,3.6 -0.65,2.9 ; -0.35,2.9 -0.35,3.6 -0.15,3.6 -0.15,2.9 ; 0.15,2.9 0.15,3.6 0.35,3.6 0.35,2.9 ; 0.65,2.9 0.65,3.6 0.85,3.6 0.85,2.9 ; 1.15,2.9 1.15,3.6 1.35,3.6 1.35,2.9 ; 1.65,2.9 1.65,3.6 1.85,3.6 1.85,2.9 ; 2.15,2.9 2.15,3.6 2.35,3.6 2.35,2.9 ; 2.65,2.9 2.65,3.6 2.85,3.6 2.85,2.9 ; 3.15,2.9 3.15,3.6 3.35,3.6 3.35,2.9 ; 3.65,2.9 3.65,3.6 3.85,3.6 3.85,2.9 ; 4.15,2.9 4.15,3.6 4.35,3.6 4.35,2.9 ; 4.65,2.9 4.65,3.6 4.85,3.6 4.85,2.9 ; -7.05,-2.9 -7.05,2.9 7.05,2.9 7.05,-2.9 -7.05,-2.9
Top Courtyard:
  lines w0.05: -0.5,0 0.5,0 ; 0,-0.5 0,0.5 ; -7.75,-3.175 7.75,-3.175 7.75,4.2 -7.75,4.2 -7.75,-3.175
3D body "687120149022.stp": height 2.25, standoff 0, extent -7.05,-2.9 7.05,3.6

## 687120182122 [mm] "ZIF Connectors, Horizontal, Dual Contact Back Locking, pitch 0.5mm, 20p"
height 1.06
pads (22):
  rect 0.3x0.8 smd: 1(-4.75,1.1) 2(-4.25,1.1) 3(-3.75,1.1) 4(-3.25,1.1) 5(-2.75,1.1) 6(-2.25,1.1) 7(-1.75,1.1) 8(-1.25,1.1) 9(-0.75,1.1) 10(-0.25,1.1) 11(0.25,1.1) 12(0.75,1.1) 13(1.25,1.1) 14(1.75,1.1) 15(2.25,1.1) 16(2.75,1.1) 17(3.25,1.1) 18(3.75,1.1) 19(4.25,1.1) 20(4.75,1.1)
  rect 0.4x0.8 smd: M1(-5.75,-1.4) M2(5.75,-1.4)
Top Overlay:
  circle w0.15: c-4.8,2.3 r0.075
  lines w0.2: -6.075,-0.7 -6.075,1.05 -5.3,1.05 -5.3,1.425 -5.75,1.425 -5.75,1.925 5.75,1.925 5.75,1.425 5.3,1.425 5.3,1.05 6.075,1.05 6.075,-0.7 ; -5.25,-1.925 5.25,-1.925
Top Designator:
  text ".Designator" at -7.498,-0.5 h1.5
Top Component Outline:
  lines w0.1: -6,-1.15 -5.8,-1.15 -5.8,-1.85 5.8,-1.85 5.8,-1.15 6,-1.15 6,1.05 5.3,1.05 5.3,1.35 5.75,1.35 5.75,1.85 -5.75,1.85 -5.75,1.35 -5.3,1.35 -5.3,1.05 -6,1.05 -6,-1.15
Top 3D Body:
  lines w0.1: -6,-1.15 -6,1.05 -5.3,1.05 -5.3,1.35 -5.75,1.35 -5.75,1.85 5.75,1.85 5.75,1.35 5.3,1.35 5.3,1.05 6,1.05 6,-1.15 5.8,-1.15 5.8,-1.85 -5.8,-1.85 -5.8,-1.15 -6,-1.15
Top Courtyard:
  lines w0.05: -0.5,0 0.5,0 ; 0,-0.5 0,0.5 ; -6.275,-2.125 6.275,-2.125 6.275,2.125 -6.275,2.125 -6.275,-2.125
3D body "687120182122.stp": height 0.98, standoff -0.01, extent -6,-1.85 6,1.85

## 687120183622 [mm] "ZIF Connectors, Horizontal, Top Contact Low Profile, pitch 0.5mm, 20p"
height 1.3
pads (22):
  rect 0.3x1 smd: 1(-4.75,2.3) 2(-4.25,2.3) 3(-3.75,2.3) 4(-3.25,2.3) 5(-2.75,2.3) 6(-2.25,2.3) 7(-1.75,2.3) 8(-1.25,2.3) 9(-0.75,2.3) 10(-0.25,2.3) 11(0.25,2.3) 12(0.75,2.3) 13(1.25,2.3) 14(1.75,2.3) 15(2.25,2.3) 16(2.75,2.3) 17(3.25,2.3) 18(3.75,2.3) 19(4.25,2.3) 20(4.75,2.3)
  rect 1.65x1.3 smd: M1(-7.025,0.4) M2(7.025,0.4)
Top Overlay:
  circle w0.25: c-5.5,2.6 r0.125
  lines w0.2: -7.15,-0.55 -7.15,-1 -7.925,-1 -7.925,-1.95 7.925,-1.95 7.925,-1 7.15,-1 7.15,-0.55 ; -7.15,1.35 -7.15,1.95 -5.2,1.95 ; 5.2,1.95 7.15,1.95 7.15,1.35
Top Designator:
  text ".Designator" at -7.498,-0.5 h1.5
Top Component Outline:
  lines w0.1: -4.85,1.9 -4.85,2.35 -4.65,2.35 -4.65,1.9 ; -4.35,1.9 -4.35,2.35 -4.15,2.35 -4.15,1.9 ; -3.85,1.9 -3.85,2.35 -3.65,2.35 -3.65,1.9 ; -3.35,1.9 -3.35,2.35 -3.15,2.35 -3.15,1.9 ; -2.85,1.9 -2.85,2.35 -2.65,2.35 -2.65,1.9 ; -2.35,1.9 -2.35,2.35 -2.15,2.35 -2.15,1.9 ; -1.85,1.9 -1.85,2.35 -1.65,2.35 -1.65,1.9 ; -1.35,1.9 -1.35,2.35 -1.15,2.35 -1.15,1.9 ; -0.85,1.9 -0.85,2.35 -0.65,2.35 -0.65,1.9 ; -0.35,1.9 -0.35,2.35 -0.15,2.35 -0.15,1.9 ; 0.15,1.9 0.15,2.35 0.35,2.35 0.35,1.9 ; 0.65,1.9 0.65,2.35 0.85,2.35 0.85,1.9 ; 1.15,1.9 1.15,2.35 1.35,2.35 1.35,1.9 ; 1.65,1.9 1.65,2.35 1.85,2.35 1.85,1.9 ; 2.15,1.9 2.15,2.35 2.35,2.35 2.35,1.9 ; 2.65,1.9 2.65,2.35 2.85,2.35 2.85,1.9 ; 3.15,1.9 3.15,2.35 3.35,2.35 3.35,1.9 ; 3.65,1.9 3.65,2.35 3.85,2.35 3.85,1.9 ; 4.15,1.9 4.15,2.35 4.35,2.35 4.35,1.9 ; 4.65,1.9 4.65,2.35 4.85,2.35 4.85,1.9 ; -7.85,-1.9 7.85,-1.9 7.85,-1 7.15,-1 7.15,1.9 -7.15,1.9 -7.15,-1 -7.85,-1 -7.85,-1.9
Top 3D Body:
  lines w0.1: -4.85,1.9 -4.85,2.35 -4.65,2.35 -4.65,1.9 ; -4.35,1.9 -4.35,2.35 -4.15,2.35 -4.15,1.9 ; -3.85,1.9 -3.85,2.35 -3.65,2.35 -3.65,1.9 ; -3.35,1.9 -3.35,2.35 -3.15,2.35 -3.15,1.9 ; -2.85,1.9 -2.85,2.35 -2.65,2.35 -2.65,1.9 ; -2.35,1.9 -2.35,2.35 -2.15,2.35 -2.15,1.9 ; -1.85,1.9 -1.85,2.35 -1.65,2.35 -1.65,1.9 ; -1.35,1.9 -1.35,2.35 -1.15,2.35 -1.15,1.9 ; -0.85,1.9 -0.85,2.35 -0.65,2.35 -0.65,1.9 ; -0.35,1.9 -0.35,2.35 -0.15,2.35 -0.15,1.9 ; 0.15,1.9 0.15,2.35 0.35,2.35 0.35,1.9 ; 0.65,1.9 0.65,2.35 0.85,2.35 0.85,1.9 ; 1.15,1.9 1.15,2.35 1.35,2.35 1.35,1.9 ; 1.65,1.9 1.65,2.35 1.85,2.35 1.85,1.9 ; 2.15,1.9 2.15,2.35 2.35,2.35 2.35,1.9 ; 2.65,1.9 2.65,2.35 2.85,2.35 2.85,1.9 ; 3.15,1.9 3.15,2.35 3.35,2.35 3.35,1.9 ; 3.65,1.9 3.65,2.35 3.85,2.35 3.85,1.9 ; 4.15,1.9 4.15,2.35 4.35,2.35 4.35,1.9 ; 4.65,1.9 4.65,2.35 4.85,2.35 4.85,1.9 ; -7.85,-1.9 -7.85,-1 -7.15,-1 -7.15,1.9 7.15,1.9 7.15,-1 7.85,-1 7.85,-1.9 -7.85,-1.9
Top Courtyard:
  lines w0.05: -0.5,0 0.5,0 ; 0,-0.5 0,0.5 ; -8.125,-2.15 8.125,-2.15 8.125,3 -8.125,3 -8.125,-2.15
3D body "687120183622.stp": height 1.28, standoff -0.01, extent -7.85,-1.9 7.85,2.35

## 687120183722 [mm] "ZIF Connectors, Horizontal, Bottom Contact Low Profile, pitch 0.5mm, 20p"
height 1.3
pads (22):
  rect 0.3x1 smd: 1(-4.75,2.3) 2(-4.25,2.3) 3(-3.75,2.3) 4(-3.25,2.3) 5(-2.75,2.3) 6(-2.25,2.3) 7(-1.75,2.3) 8(-1.25,2.3) 9(-0.75,2.3) 10(-0.25,2.3) 11(0.25,2.3) 12(0.75,2.3) 13(1.25,2.3) 14(1.75,2.3) 15(2.25,2.3) 16(2.75,2.3) 17(3.25,2.3) 18(3.75,2.3) 19(4.25,2.3) 20(4.75,2.3)
  rect 1.65x1.3 smd: M1(-7.025,0.4) M2(7.025,0.4)
Top Overlay:
  circle w0.25: c-5.45,2.5 r0.125
  lines w0.2: -7.225,-0.55 -7.225,-1 -7.925,-1 -7.925,-1.95 7.925,-1.95 7.925,-1 7.225,-1 7.225,-0.55 ; -7.225,1.35 -7.225,1.95 -5.225,1.95 ; 5.225,1.95 7.225,1.95 7.225,1.35
Top Designator:
  text ".Designator" at -7.498,-0.5 h1.5
Top Component Outline:
  lines w0.1: -4.85,1.9 -4.85,2.35 -4.65,2.35 -4.65,1.9 ; -4.35,1.9 -4.35,2.35 -4.15,2.35 -4.15,1.9 ; -3.85,1.9 -3.85,2.35 -3.65,2.35 -3.65,1.9 ; -3.35,1.9 -3.35,2.35 -3.15,2.35 -3.15,1.9 ; -2.85,1.9 -2.85,2.35 -2.65,2.35 -2.65,1.9 ; -2.35,1.9 -2.35,2.35 -2.15,2.35 -2.15,1.9 ; -1.85,1.9 -1.85,2.35 -1.65,2.35 -1.65,1.9 ; -1.35,1.9 -1.35,2.35 -1.15,2.35 -1.15,1.9 ; -0.85,1.9 -0.85,2.35 -0.65,2.35 -0.65,1.9 ; -0.35,1.9 -0.35,2.35 -0.15,2.35 -0.15,1.9 ; 0.15,1.9 0.15,2.35 0.35,2.35 0.35,1.9 ; 0.65,1.9 0.65,2.35 0.85,2.35 0.85,1.9 ; 1.15,1.9 1.15,2.35 1.35,2.35 1.35,1.9 ; 1.65,1.9 1.65,2.35 1.85,2.35 1.85,1.9 ; 2.15,1.9 2.15,2.35 2.35,2.35 2.35,1.9 ; 2.65,1.9 2.65,2.35 2.85,2.35 2.85,1.9 ; 3.15,1.9 3.15,2.35 3.35,2.35 3.35,1.9 ; 3.65,1.9 3.65,2.35 3.85,2.35 3.85,1.9 ; 4.15,1.9 4.15,2.35 4.35,2.35 4.35,1.9 ; 4.65,1.9 4.65,2.35 4.85,2.35 4.85,1.9 ; -7.85,-1.9 7.85,-1.9 7.85,-1 7.15,-1 7.15,1.9 -7.15,1.9 -7.15,-1 -7.85,-1 -7.85,-1.9
Top 3D Body:
  lines w0.1: -4.85,1.9 -4.85,2.35 -4.65,2.35 -4.65,1.9 ; -4.35,1.9 -4.35,2.35 -4.15,2.35 -4.15,1.9 ; -3.85,1.9 -3.85,2.35 -3.65,2.35 -3.65,1.9 ; -3.35,1.9 -3.35,2.35 -3.15,2.35 -3.15,1.9 ; -2.85,1.9 -2.85,2.35 -2.65,2.35 -2.65,1.9 ; -2.35,1.9 -2.35,2.35 -2.15,2.35 -2.15,1.9 ; -1.85,1.9 -1.85,2.35 -1.65,2.35 -1.65,1.9 ; -1.35,1.9 -1.35,2.35 -1.15,2.35 -1.15,1.9 ; -0.85,1.9 -0.85,2.35 -0.65,2.35 -0.65,1.9 ; -0.35,1.9 -0.35,2.35 -0.15,2.35 -0.15,1.9 ; 0.15,1.9 0.15,2.35 0.35,2.35 0.35,1.9 ; 0.65,1.9 0.65,2.35 0.85,2.35 0.85,1.9 ; 1.15,1.9 1.15,2.35 1.35,2.35 1.35,1.9 ; 1.65,1.9 1.65,2.35 1.85,2.35 1.85,1.9 ; 2.15,1.9 2.15,2.35 2.35,2.35 2.35,1.9 ; 2.65,1.9 2.65,2.35 2.85,2.35 2.85,1.9 ; 3.15,1.9 3.15,2.35 3.35,2.35 3.35,1.9 ; 3.65,1.9 3.65,2.35 3.85,2.35 3.85,1.9 ; 4.15,1.9 4.15,2.35 4.35,2.35 4.35,1.9 ; 4.65,1.9 4.65,2.35 4.85,2.35 4.85,1.9 ; -7.85,-1.9 -7.85,-1 -7.15,-1 -7.15,1.9 7.15,1.9 7.15,-1 7.85,-1 7.85,-1.9 -7.85,-1.9
Top Courtyard:
  lines w0.05: -0.5,0 0.5,0 ; 0,-0.5 0,0.5 ; -8.125,-2.15 8.125,-2.15 8.125,3 -8.125,3 -8.125,-2.15
3D body "687120183722.stp": height 1.28, standoff -0.01, extent -7.85,-1.9 7.85,2.35

## 687120188722 [mm] "0.5 mm LIF Horizontal FFC Connector, 20pins"
height 1.2
pads (22):
  rect 0.35x0.8 smd: 1(-4.75,2.05) 2(-4.25,2.05) 3(-3.75,2.05) 4(-3.25,2.05) 5(-2.75,2.05) 6(-2.25,2.05) 7(-1.75,2.05) 8(-1.25,2.05) 9(-0.75,2.05) 10(-0.25,2.05) 11(0.25,2.05) 12(0.75,2.05) 13(1.25,2.05) 14(1.75,2.05) 15(2.25,2.05) 16(2.75,2.05) 17(3.25,2.05) 18(3.75,2.05) 19(4.25,2.05) 20(4.75,2.05)
  rect 0.6x2.6 smd: M1(-5.65,-0.25) M2(5.65,-0.25)
Top Overlay:
  circle w0.25: c-5.45,2.25 r0.125
  lines w0.1: -6,-1.8 6,-1.8 ; -6,1.35 -6,1.8 -5.2,1.8 ; 5.2,1.8 6,1.8 6,1.35
Top Designator:
  text ".Designator" at -7.498,-0.5 h1.5
Top Component Outline:
  lines w0.1: -4.85,1.8 -4.85,2.3 -4.65,2.3 -4.65,1.8 ; -4.35,1.8 -4.35,2.3 -4.15,2.3 -4.15,1.8 ; -3.85,1.8 -3.85,2.3 -3.65,2.3 -3.65,1.8 ; -3.35,1.8 -3.35,2.3 -3.15,2.3 -3.15,1.8 ; -2.85,1.8 -2.85,2.3 -2.65,2.3 -2.65,1.8 ; -2.35,1.8 -2.35,2.3 -2.15,2.3 -2.15,1.8 ; -1.85,1.8 -1.85,2.3 -1.65,2.3 -1.65,1.8 ; -1.35,1.8 -1.35,2.3 -1.15,2.3 -1.15,1.8 ; -0.85,1.8 -0.85,2.3 -0.65,2.3 -0.65,1.8 ; -0.35,1.8 -0.35,2.3 -0.15,2.3 -0.15,1.8 ; 0.15,1.8 0.15,2.3 0.35,2.3 0.35,1.8 ; 0.65,1.8 0.65,2.3 0.85,2.3 0.85,1.8 ; 1.15,1.8 1.15,2.3 1.35,2.3 1.35,1.8 ; 1.65,1.8 1.65,2.3 1.85,2.3 1.85,1.8 ; 2.15,1.8 2.15,2.3 2.35,2.3 2.35,1.8 ; 2.65,1.8 2.65,2.3 2.85,2.3 2.85,1.8 ; 3.15,1.8 3.15,2.3 3.35,2.3 3.35,1.8 ; 3.65,1.8 3.65,2.3 3.85,2.3 3.85,1.8 ; 4.15,1.8 4.15,2.3 4.35,2.3 4.35,1.8 ; 4.65,1.8 4.65,2.3 4.85,2.3 4.85,1.8 ; -6,-1.8 6,-1.8 6,1.8 -6,1.8 -6,-1.8
Top 3D Body:
  lines w0.1: -4.85,1.8 -4.85,2.3 -4.65,2.3 -4.65,1.8 ; -4.35,1.8 -4.35,2.3 -4.15,2.3 -4.15,1.8 ; -3.85,1.8 -3.85,2.3 -3.65,2.3 -3.65,1.8 ; -3.35,1.8 -3.35,2.3 -3.15,2.3 -3.15,1.8 ; -2.85,1.8 -2.85,2.3 -2.65,2.3 -2.65,1.8 ; -2.35,1.8 -2.35,2.3 -2.15,2.3 -2.15,1.8 ; -1.85,1.8 -1.85,2.3 -1.65,2.3 -1.65,1.8 ; -1.35,1.8 -1.35,2.3 -1.15,2.3 -1.15,1.8 ; -0.85,1.8 -0.85,2.3 -0.65,2.3 -0.65,1.8 ; -0.35,1.8 -0.35,2.3 -0.15,2.3 -0.15,1.8 ; 0.15,1.8 0.15,2.3 0.35,2.3 0.35,1.8 ; 0.65,1.8 0.65,2.3 0.85,2.3 0.85,1.8 ; 1.15,1.8 1.15,2.3 1.35,2.3 1.35,1.8 ; 1.65,1.8 1.65,2.3 1.85,2.3 1.85,1.8 ; 2.15,1.8 2.15,2.3 2.35,2.3 2.35,1.8 ; 2.65,1.8 2.65,2.3 2.85,2.3 2.85,1.8 ; 3.15,1.8 3.15,2.3 3.35,2.3 3.35,1.8 ; 3.65,1.8 3.65,2.3 3.85,2.3 3.85,1.8 ; 4.15,1.8 4.15,2.3 4.35,2.3 4.35,1.8 ; 4.65,1.8 4.65,2.3 4.85,2.3 4.85,1.8 ; -6,-1.8 -6,1.8 6,1.8 6,-1.8 -6,-1.8
Top Courtyard:
  lines w0.05: -0.5,0 0.5,0 ; 0,-0.5 0,0.5 ; -6.2,-2 6.2,-2 6.2,2.65 -6.2,2.65 -6.2,-2
3D body "687120188722.stp": height 1.2, standoff 0, extent -6,-1.8 6,2.3

## 687122149022 [mm] "0.50mm SMT ZIF Horizontal Hinge Type Bottom Contact, 22p"
height 2.3
pads (24):
  rect 0.3x1.3 smd: 1(-5.25,3.35) 2(-4.75,3.35) 3(-4.25,3.35) 4(-3.75,3.35) 5(-3.25,3.35) 6(-2.75,3.35) 7(-2.25,3.35) 8(-1.75,3.35) 9(-1.25,3.35) 10(-0.75,3.35) 11(-0.25,3.35) 12(0.25,3.35) 13(0.75,3.35) 14(1.25,3.35) 15(1.75,3.35) 16(2.25,3.35) 17(2.75,3.35) 18(3.25,3.35) 19(3.75,3.35) 20(4.25,3.35) 21(4.75,3.35) 22(5.25,3.35)
  rect 2x1.8 smd: M1(-7.05,0.6) M2(7.05,0.6)
Top Overlay:
  circle w0.25: c-6.05,3.55 r0.125
  lines w0.2: -7.625,-0.625 -7.625,-2.975 7.625,-2.975 7.625,-0.625 ; -7.625,1.825 -7.625,2.975 -5.725,2.975 ; 5.725,2.975 7.625,2.975 7.625,1.825
Top Designator:
  text ".Designator" at -7.498,-0.5 h1.5
Top Component Outline:
  lines w0.1: -5.35,2.9 -5.35,3.6 -5.15,3.6 -5.15,2.9 ; -4.85,2.9 -4.85,3.6 -4.65,3.6 -4.65,2.9 ; -4.35,2.9 -4.35,3.6 -4.15,3.6 -4.15,2.9 ; -3.85,2.9 -3.85,3.6 -3.65,3.6 -3.65,2.9 ; -3.35,2.9 -3.35,3.6 -3.15,3.6 -3.15,2.9 ; -2.85,2.9 -2.85,3.6 -2.65,3.6 -2.65,2.9 ; -2.35,2.9 -2.35,3.6 -2.15,3.6 -2.15,2.9 ; -1.85,2.9 -1.85,3.6 -1.65,3.6 -1.65,2.9 ; -1.35,2.9 -1.35,3.6 -1.15,3.6 -1.15,2.9 ; -0.85,2.9 -0.85,3.6 -0.65,3.6 -0.65,2.9 ; -0.35,2.9 -0.35,3.6 -0.15,3.6 -0.15,2.9 ; 0.15,2.9 0.15,3.6 0.35,3.6 0.35,2.9 ; 0.65,2.9 0.65,3.6 0.85,3.6 0.85,2.9 ; 1.15,2.9 1.15,3.6 1.35,3.6 1.35,2.9 ; 1.65,2.9 1.65,3.6 1.85,3.6 1.85,2.9 ; 2.15,2.9 2.15,3.6 2.35,3.6 2.35,2.9 ; 2.65,2.9 2.65,3.6 2.85,3.6 2.85,2.9 ; 3.15,2.9 3.15,3.6 3.35,3.6 3.35,2.9 ; 3.65,2.9 3.65,3.6 3.85,3.6 3.85,2.9 ; 4.15,2.9 4.15,3.6 4.35,3.6 4.35,2.9 ; 4.65,2.9 4.65,3.6 4.85,3.6 4.85,2.9 ; 5.15,2.9 5.15,3.6 5.35,3.6 5.35,2.9 ; -7.55,-2.9 7.55,-2.9 7.55,2.9 -7.55,2.9 -7.55,-2.9
Top 3D Body:
  lines w0.1: -5.35,2.9 -5.35,3.6 -5.15,3.6 -5.15,2.9 ; -4.85,2.9 -4.85,3.6 -4.65,3.6 -4.65,2.9 ; -4.35,2.9 -4.35,3.6 -4.15,3.6 -4.15,2.9 ; -3.85,2.9 -3.85,3.6 -3.65,3.6 -3.65,2.9 ; -3.35,2.9 -3.35,3.6 -3.15,3.6 -3.15,2.9 ; -2.85,2.9 -2.85,3.6 -2.65,3.6 -2.65,2.9 ; -2.35,2.9 -2.35,3.6 -2.15,3.6 -2.15,2.9 ; -1.85,2.9 -1.85,3.6 -1.65,3.6 -1.65,2.9 ; -1.35,2.9 -1.35,3.6 -1.15,3.6 -1.15,2.9 ; -0.85,2.9 -0.85,3.6 -0.65,3.6 -0.65,2.9 ; -0.35,2.9 -0.35,3.6 -0.15,3.6 -0.15,2.9 ; 0.15,2.9 0.15,3.6 0.35,3.6 0.35,2.9 ; 0.65,2.9 0.65,3.6 0.85,3.6 0.85,2.9 ; 1.15,2.9 1.15,3.6 1.35,3.6 1.35,2.9 ; 1.65,2.9 1.65,3.6 1.85,3.6 1.85,2.9 ; 2.15,2.9 2.15,3.6 2.35,3.6 2.35,2.9 ; 2.65,2.9 2.65,3.6 2.85,3.6 2.85,2.9 ; 3.15,2.9 3.15,3.6 3.35,3.6 3.35,2.9 ; 3.65,2.9 3.65,3.6 3.85,3.6 3.85,2.9 ; 4.15,2.9 4.15,3.6 4.35,3.6 4.35,2.9 ; 4.65,2.9 4.65,3.6 4.85,3.6 4.85,2.9 ; 5.15,2.9 5.15,3.6 5.35,3.6 5.35,2.9 ; -7.55,-2.9 -7.55,2.9 7.55,2.9 7.55,-2.9 -7.55,-2.9
Top Courtyard:
  lines w0.05: -0.5,0 0.5,0 ; 0,-0.5 0,0.5 ; -8.25,-3.175 8.25,-3.175 8.25,4.2 -8.25,4.2 -8.25,-3.175
3D body "687122149022.stp": height 2.25, standoff 0, extent -7.55,-2.9 7.55,3.6